# Altium footprint library 9288141.PcbLib: 1 footprints
Each footprint in its own frame and in the unit in brackets; x right, y up, seen from the top. Pads: shape width x height; smd on the part's side, far side on the other; paste and mask are expansions set on the pad; w line width, h text height; cw(c..) or ccw(c..) is an arc to the next point about the centre after c.
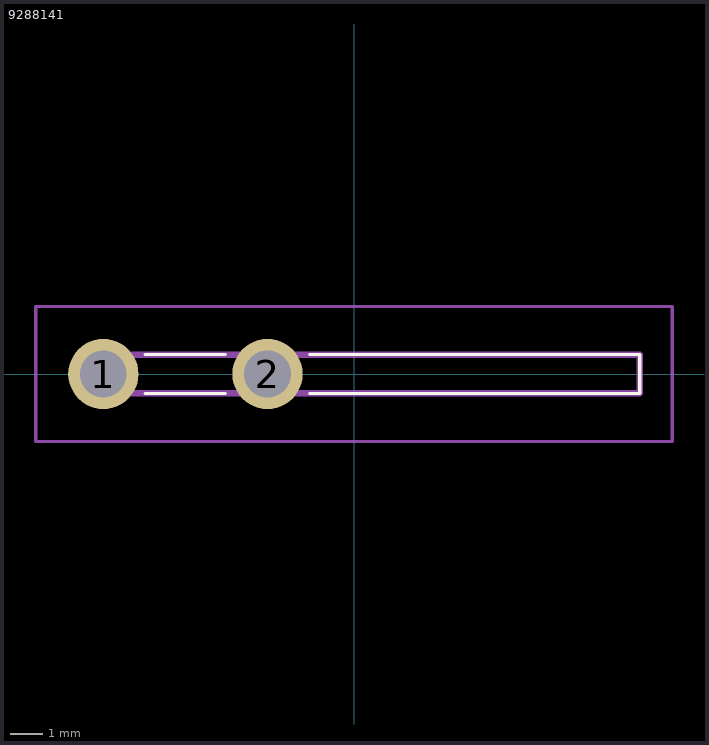
[diagram p0: the footprint, top view; thin cyan lines are the x and y axes]

## 9288141 [mm]
pads (2):
  round 2.175 hole 1.45: 1(-7.756,0) 2(-2.676,0)
Top Overlay:
  lines w0.1: -6.456,-0.6 -3.976,-0.6 ; -6.456,0.6 -3.976,0.6 ; -1.376,-0.6 8.844,-0.6 8.844,0.6 -1.376,0.6
Mechanical 15:
  lines w0.2: -7.156,-0.6 8.844,-0.6 8.844,0.6 -7.156,0.6 -7.156,-0.6
Mechanical 20:
  lines w0.1: -9.844,-2.087 9.844,-2.087 9.844,2.087 -9.844,2.087 -9.844,-2.087